# Altium integrated library RNCF0402DTE1K50.IntLib: 1 symbol
Pins are listed as number, name and electrical type; pins without a type are passive.

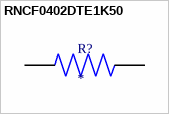
[diagram p0: symbol RNCF0402DTE1K50]

## RNCF0402DTE1K50
designator R?
MP: RNCF0402DTE1K50; Package: None; Price: None; Value: *; Availability: Unavailable
footprint RESC1005X35N
pins: 1, 2